# Altium footprint library PcbLib1.PcbLib: 24 footprints (part 2 of 2)
Each footprint in its own frame and in the unit in brackets; x right, y up, seen from the top. Pads: shape width x height; smd on the part's side, far side on the other; paste and mask are expansions set on the pad; w line width, h text height; cw(c..) or ccw(c..) is an arc to the next point about the centre after c.
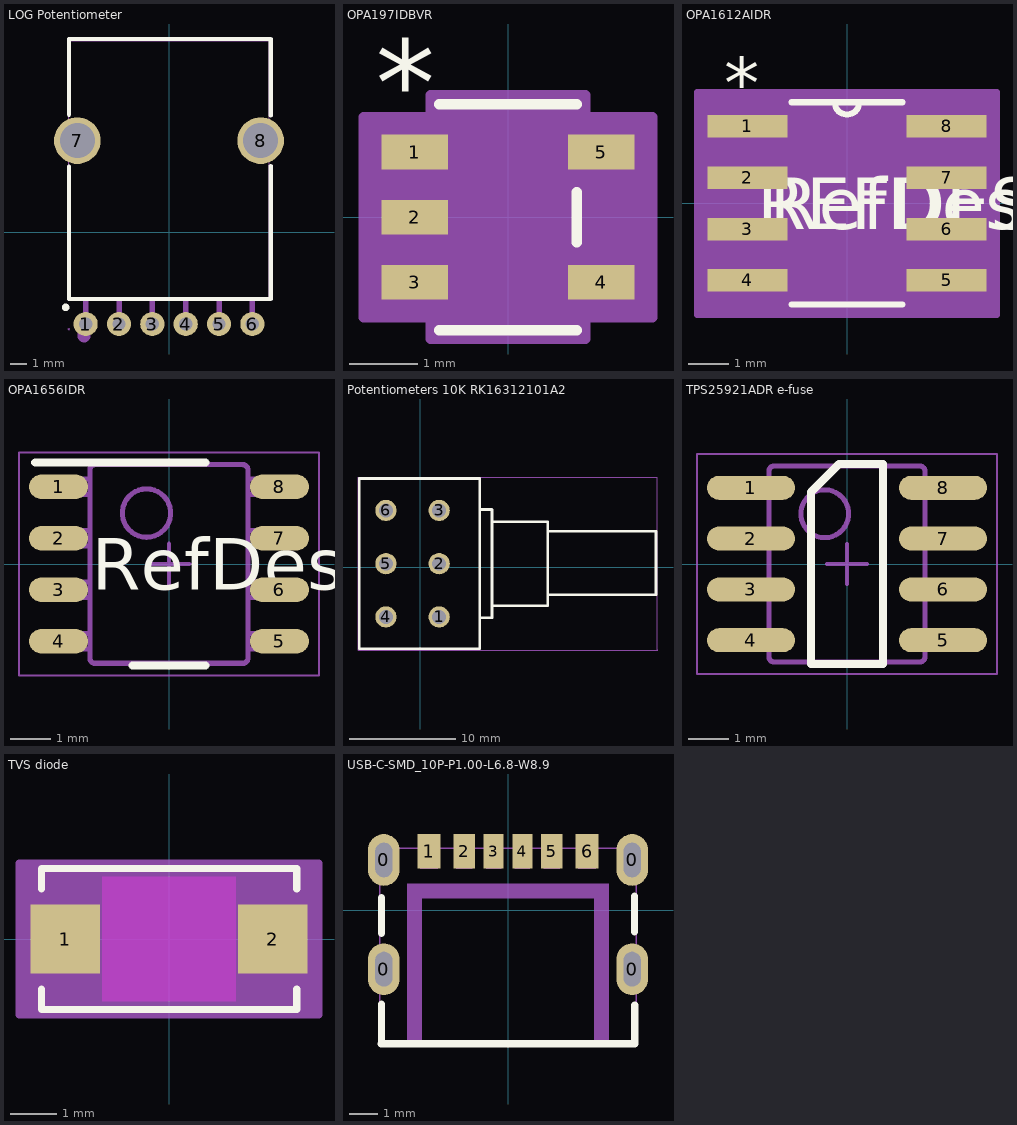
[diagram p1: the footprints below, top view; thin cyan lines are the x and y axes]

## LOG Potentiometer [mm]
pads (8):
  round 1.45 hole 0.8 paste-2539.97 mask+0.05: 1(-5,-5.5) 2(-3,-5.5) 3(-1,-5.5) 4(1,-5.5) 5(3,-5.5) 6(5,-5.5)
  round 2.8 hole 2.1 paste-2539.97 mask+0.05: 7(-5.5,5.5) 8(5.5,5.5)
Top Overlay:
  circle w0.254: c-6.2,-4.5 r0.1
  lines w0.254: -6,3.947 -6,-4.001 6.1,-4.001 6.1,3.983 ; -6,7.052 -6,11.599 6.1,11.599 6.1,7.017
Mechanical 2:
  circle w0.4: c-5.1,-6.2 r0.2
Mechanical 6:
  lines w0.051: -6,-4.001 6,-4.001 6,11.499 -6,11.499 -6,-4.001
Mechanical 7:
  region: 4.851,-5.795 4.851,-3.95 5.151,-3.95 5.151,-5.795
  region: 2.851,-5.795 2.851,-3.95 3.151,-3.95 3.151,-5.795
  region: 0.851,-5.795 0.851,-3.95 1.151,-3.95 1.151,-5.795
  region: -1.149,-5.795 -1.149,-3.95 -0.849,-3.95 -0.849,-5.795
  region: -3.149,-5.795 -3.149,-3.95 -2.849,-3.95 -2.849,-5.795
  region: -5.149,-5.795 -5.149,-3.95 -4.849,-3.95 -4.849,-5.795
Mechanical 8:
  region: -5.94,-5.8 -5.94,-5.825 -5.975,-5.86 -6.025,-5.86 -6.06,-5.825 -6.06,-5.8 -6.06,-5.775 -6.025,-5.74 -5.975,-5.74 -5.94,-5.775
Mechanical 9:
  region: -5.65,4.5 -5.65,6.5 -5.35,6.5 -5.35,4.5
  region: 5.35,4.5 5.35,6.5 5.65,6.5 5.65,4.5
  region: -5.15,-5.8 -5.15,-5.2 -4.85,-5.2 -4.85,-5.8
  region: -3.15,-5.8 -3.15,-5.2 -2.85,-5.2 -2.85,-5.8
  region: -1.15,-5.8 -1.15,-5.2 -0.85,-5.2 -0.85,-5.8
  region: 0.85,-5.8 0.85,-5.2 1.15,-5.2 1.15,-5.8
  region: 2.85,-5.8 2.85,-5.2 3.15,-5.2 3.15,-5.8
  region: 4.85,-5.8 4.85,-5.2 5.15,-5.2 5.15,-5.8

## OPA197IDBVR [mil]
pads (5):
  rect 38.28x20 smd paste+0 mask+0: 1(-53.64,37.4) 2(-53.64,0) 3(-53.64,-37.4) 4(53.64,-37.4) 5(53.64,37.4)
Top Overlay:
  lines w6: -39.5,-65 39.5,-65 ; -39.5,65 39.5,65 ; 39.5,-14.3 39.5,14.3
  text "*" at -76.14,52.4 h50
  text ".Designator" at -137.5,-25 h50
Mechanical 13:
  lines w1: -12,60 ccw(c0,60) 12,60 ; -59,-47.4 -59,-27.4 -34.5,-27.4 -34.5,-47.4 -59,-47.4 ; -59,-10 -59,10 -34.5,10 -34.5,-10 -59,-10 ; -59,27.4 -59,47.4 -34.5,47.4 -34.5,27.4 -59,27.4 ; -34.5,-60 34.5,-60 34.5,60 -34.5,60 -34.5,-60 ; 34.5,-47.4 34.5,-27.4 59,-27.4 59,-47.4 34.5,-47.4 ; 34.5,27.4 34.5,47.4 59,47.4 59,27.4 34.5,27.4
  text ".Designator" at -137.5,-25 h50
  text "*" at -37,14.4 h50
Mechanical 15:
  region: 44.5,-70 -44.5,-70 -44.5,-57.4 -82.78,-57.4 -82.78,57.4 -44.5,57.4 -44.5,70 44.5,70 44.5,57.4 82.78,57.4 82.78,-57.4 44.5,-57.4
  lines w6: -82.78,-57.4 -44.5,-57.4 -44.5,-70 44.5,-70 44.5,-57.4 82.78,-57.4 82.78,57.4 44.5,57.4 44.5,70 -44.5,70 -44.5,57.4 -82.78,57.4 -82.78,-57.4
3D body "DBV5_TEX.step": height 57.09, standoff 0, extent -59.02,-60 59.02,60

## OPA1612AIDR [mil]
pads (8):
  rect 78x22 smd paste-39 mask-39: 1(-97,75) 2(-97,25) 3(-97,-25) 4(-97,-75) 5(97,-75) 6(97,-25) 7(97,25) 8(97,75)
Top Overlay:
  lines w6: -54.08,-98.5 54.08,-98.5 ; -54.08,98.5 54.08,98.5 ; -12,98.5 ccw(c0,98.5) 12,98.5
  text "REFDES" at -87.5,-25 h50
  text "*" at -119.5,92 h50
  text "RefDes" at -75,-25 h50
Mechanical 13:
  lines w0: -12,98.5 ccw(c0,98.5) 12,98.5
  lines w1: -122,-85 -122,-65 -78.5,-65 -78.5,-85 -122,-85 ; -122,-35 -122,-15 -78.5,-15 -78.5,-35 -122,-35 ; -122,15 -122,35 -78.5,35 -78.5,15 -122,15 ; -122,65 -122,85 -78.5,85 -78.5,65 -122,65 ; -78.5,-98.5 78.5,-98.5 78.5,98.5 -78.5,98.5 -78.5,-98.5 ; 78.5,-85 78.5,-65 122,-65 122,-85 78.5,-85 ; 78.5,-35 78.5,-15 122,-15 122,-35 78.5,-35 ; 78.5,15 78.5,35 122,35 122,15 78.5,15 ; 78.5,65 78.5,85 122,85 122,65 78.5,65
  text "*" at -119.5,92 h50
  text "RefDes2" at -87.5,-25 h50
Mechanical 15:
  region: 146,-108.5 -146,-108.5 -146,108.5 146,108.5
  lines w6: -146,-108.5 -146,108.5 146,108.5 146,-108.5 -146,-108.5
3D body "D8.step": height 69.09, standoff 0, extent -122.01,-98.5 122.01,98.5

## OPA1656IDR [mm]
pads (8):
  oval 1.45x0.6 smd paste+0 mask+0: 1(-2.725,1.905) 2(-2.725,0.635) 3(-2.725,-0.635) 4(-2.725,-1.905) 5(2.725,-1.905) 6(2.725,-0.635) 7(2.725,0.635) 8(2.725,1.905)
Top Overlay:
  lines w0.2: -3.3,2.5 0.9,2.5 ; -0.9,-2.5 0.9,-2.5
  text "RefDes" at -1.905,-0.635 h1.27
Mechanical 13:
  lines w0.127: -2.375,-2.095 -2.375,-1.715 ; -2.375,-2.095 -2.589,-2.095 -3.002,-2.095 -3.002,-1.715 -2.589,-1.715 -2.375,-1.715 ; -2.375,-2.095 -1.995,-2.095 -1.952,-2.095 -1.952,-1.715 -1.995,-1.715 -2.375,-1.715 ; -2.375,-0.825 -2.375,-0.445 ; -2.375,-0.825 -2.589,-0.825 -3.002,-0.825 -3.002,-0.445 -2.589,-0.445 -2.375,-0.445 ; -2.375,-0.825 -1.995,-0.825 -1.952,-0.825 -1.952,-0.445 -1.995,-0.445 -2.375,-0.445 ; -2.375,0.445 -2.375,0.825 ; -2.375,0.445 -2.589,0.445 -3.002,0.445 -3.002,0.825 -2.589,0.825 -2.375,0.825 ; -2.375,0.445 -1.995,0.445 -1.952,0.445 -1.952,0.825 -1.995,0.825 -2.375,0.825 ; -2.375,1.715 -2.375,2.095 ; -2.375,1.715 -2.589,1.715 -3.002,1.715 -3.002,2.095 -2.589,2.095 -2.375,2.095 ; -2.375,1.715 -1.995,1.715 -1.952,1.715 -1.952,2.095 -1.995,2.095 -2.375,2.095 ; -0.332,-2.45 -0.182,-2.45 ; -0.332,-2.45 -0.182,-2.45 ; -0.332,-2.45 -1.825,-2.45 -1.826,-2.45 cw(c-1.825,-2.323) -1.952,-2.324 -1.952,-2.323 -1.952,2.323 -1.952,2.324 cw(c-1.825,2.323) -1.826,2.45 -1.825,2.45 -0.332,2.45 ; -0.332,2.45 -0.182,2.45 ; -0.332,2.45 -0.182,2.45 ; -0.182,-2.45 0.178,-2.45 ; -0.182,2.45 0.178,2.45 ; 0.178,-2.45 0.328,-2.45 ; 0.178,-2.45 0.328,-2.45 ; 0.178,2.45 0.328,2.45 ; 0.178,2.45 0.328,2.45 ; 0.328,-2.45 1.821,-2.45 1.822,-2.45 ccw(c1.821,-2.323) 1.948,-2.324 1.948,-2.323 1.948,2.323 1.948,2.324 ccw(c1.821,2.323) 1.822,2.45 1.821,2.45 0.328,2.45 ; 2.371,-2.095 2.371,-1.715 ; 2.371,-2.095 1.991,-2.095 1.948,-2.095 1.948,-1.715 1.991,-1.715 2.371,-1.715 ; 2.371,-2.095 2.585,-2.095 2.998,-2.095 2.998,-1.715 2.585,-1.715 2.371,-1.715 ; 2.371,-0.825 2.371,-0.445 ; 2.371,-0.825 1.991,-0.825 1.948,-0.825 1.948,-0.445 1.991,-0.445 2.371,-0.445 ; 2.371,-0.825 2.585,-0.825 2.998,-0.825 2.998,-0.445 2.585,-0.445 2.371,-0.445 ; 2.371,0.445 2.371,0.825 ; 2.371,0.445 1.991,0.445 1.948,0.445 1.948,0.825 1.991,0.825 2.371,0.825 ; 2.371,0.445 2.585,0.445 2.998,0.445 2.998,0.825 2.585,0.825 2.371,0.825 ; 2.371,1.715 2.371,2.095 ; 2.371,1.715 1.991,1.715 1.948,1.715 1.948,2.095 1.991,2.095 2.371,2.095 ; 2.371,1.715 2.585,1.715 2.998,1.715 2.998,2.095 2.585,2.095 2.371,2.095 ; -0.555,0.659 ccw(c-0.555,1.256) -0.555,1.853 ccw(c-0.555,1.256) -0.555,0.659
Mechanical 15:
  lines w0.05: -3.7,-2.75 -3.7,2.75 3.7,2.75 3.7,-2.75 -3.7,-2.75
  lines w0.1: -0.5,0 0.5,0 ; 0,-0.5 0,0.5

## Potentiometers 10K RK16312101A2 [mm] "10K"
pads (6):
  round 2 hole 1.3: 1(1.778,-4.686) 2(1.778,0.314) 3(1.778,5.314) 4(-3.222,-4.686) 5(-3.222,0.314) 6(-3.222,5.314)
Top Overlay:
  lines w0.254: -5.715,-7.687 5.588,-7.687 ; -5.715,-7.686 -5.715,8.315 5.588,8.315 5.588,-7.685 ; 5.588,-4.766 6.731,-4.766 ; 5.588,5.394 6.731,5.394 6.731,-4.732 ; 6.731,-3.623 11.978,-3.623 11.978,4.248 6.731,4.248 ; 11.978,-2.607 22.138,-2.607 22.138,3.362 12.105,3.362
Mechanical 6:
  lines w0.051: -5.842,-7.814 -5.842,8.442 22.265,8.442 22.265,-7.814 -5.842,-7.814
Mechanical 8:
  region: 22.325,-7.814 22.325,-7.839 22.29,-7.874 22.24,-7.874 22.205,-7.839 22.205,-7.814 22.205,-7.789 22.24,-7.754 22.29,-7.754 22.325,-7.789
Mechanical 9:
  region: 2.328,5.314 2.328,5.205 2.244,5.002 2.09,4.848 1.887,4.764 1.669,4.764 1.466,4.848 1.312,5.002 1.228,5.205 1.228,5.314 1.228,5.423 1.312,5.626 1.466,5.78 1.669,5.864 1.887,5.864 2.09,5.78 2.244,5.626 2.328,5.423
  region: 2.328,0.314 2.328,0.205 2.244,0.002 2.09,-0.152 1.887,-0.236 1.669,-0.236 1.466,-0.152 1.312,0.002 1.228,0.205 1.228,0.314 1.228,0.423 1.312,0.626 1.466,0.78 1.669,0.864 1.887,0.864 2.09,0.78 2.244,0.626 2.328,0.423
  region: 2.328,-4.686 2.328,-4.795 2.244,-4.998 2.09,-5.152 1.887,-5.236 1.669,-5.236 1.466,-5.152 1.312,-4.998 1.228,-4.795 1.228,-4.686 1.228,-4.577 1.312,-4.374 1.466,-4.22 1.669,-4.136 1.887,-4.136 2.09,-4.22 2.244,-4.374 2.328,-4.577
  region: -2.672,-4.686 -2.672,-4.795 -2.756,-4.998 -2.91,-5.152 -3.113,-5.236 -3.331,-5.236 -3.534,-5.152 -3.688,-4.998 -3.772,-4.795 -3.772,-4.686 -3.772,-4.577 -3.688,-4.374 -3.534,-4.22 -3.331,-4.136 -3.113,-4.136 -2.91,-4.22 -2.756,-4.374 -2.672,-4.577
  region: -2.672,0.314 -2.672,0.205 -2.756,0.002 -2.91,-0.152 -3.113,-0.236 -3.331,-0.236 -3.534,-0.152 -3.688,0.002 -3.772,0.205 -3.772,0.314 -3.772,0.423 -3.688,0.626 -3.534,0.78 -3.331,0.864 -3.113,0.864 -2.91,0.78 -2.756,0.626 -2.672,0.423
  region: -2.672,5.314 -2.672,5.205 -2.756,5.002 -2.91,4.848 -3.113,4.764 -3.331,4.764 -3.534,4.848 -3.688,5.002 -3.772,5.205 -3.772,5.314 -3.772,5.423 -3.688,5.626 -3.534,5.78 -3.331,5.864 -3.113,5.864 -2.91,5.78 -2.756,5.626 -2.672,5.423

## TPS25921ADR e-fuse [mm]
pads (8):
  oval 2.2x0.6 smd paste-0.102 mask+0.051: 1(-2.4,1.905) 2(-2.4,0.635) 3(-2.4,-0.635) 4(-2.4,-1.905) 5(2.4,-1.905) 6(2.4,-0.635) 7(2.4,0.635) 8(2.4,1.905)
Top Overlay:
  lines w0.2: -0.9,-2.5 -0.9,1.8 -0.2,2.5 0.9,2.5 0.9,-2.5 -0.9,-2.5
  text ".Designator" at -3.492,-0.635 h1.27
Mechanical 13:
  lines w0.127: -2.375,-2.095 -1.995,-2.095 -1.952,-2.095 -1.952,-1.715 -1.995,-1.715 -2.375,-1.715 ; -2.375,-2.095 -2.589,-2.095 -3.002,-2.095 -3.002,-1.715 -2.589,-1.715 -2.375,-1.715 ; -2.375,-2.095 -2.375,-1.715 ; -2.375,-0.825 -1.995,-0.825 -1.952,-0.825 -1.952,-0.445 -1.995,-0.445 -2.375,-0.445 ; -2.375,-0.825 -2.589,-0.825 -3.002,-0.825 -3.002,-0.445 -2.589,-0.445 -2.375,-0.445 ; -2.375,-0.825 -2.375,-0.445 ; -2.375,0.445 -1.995,0.445 -1.952,0.445 -1.952,0.825 -1.995,0.825 -2.375,0.825 ; -2.375,0.445 -2.589,0.445 -3.002,0.445 -3.002,0.825 -2.589,0.825 -2.375,0.825 ; -2.375,0.445 -2.375,0.825 ; -2.375,1.715 -1.995,1.715 -1.952,1.715 -1.952,2.095 -1.995,2.095 -2.375,2.095 ; -2.375,1.715 -2.589,1.715 -3.002,1.715 -3.002,2.095 -2.589,2.095 -2.375,2.095 ; -2.375,1.715 -2.375,2.095 ; -0.332,-2.45 -1.825,-2.45 -1.826,-2.45 cw(c-1.825,-2.323) -1.952,-2.324 -1.952,-2.323 -1.952,2.323 -1.952,2.324 cw(c-1.825,2.323) -1.826,2.45 -1.825,2.45 -0.332,2.45 ; -0.332,-2.45 -0.182,-2.45 ; -0.332,-2.45 -0.182,-2.45 ; -0.332,2.45 -0.182,2.45 ; -0.332,2.45 -0.182,2.45 ; -0.182,-2.45 0.178,-2.45 ; -0.182,2.45 0.178,2.45 ; 0.178,-2.45 0.328,-2.45 ; 0.178,-2.45 0.328,-2.45 ; 0.178,2.45 0.328,2.45 ; 0.178,2.45 0.328,2.45 ; 0.328,-2.45 1.821,-2.45 1.822,-2.45 ccw(c1.821,-2.323) 1.948,-2.324 1.948,-2.323 1.948,2.323 1.948,2.324 ccw(c1.821,2.323) 1.822,2.45 1.821,2.45 0.328,2.45 ; 2.371,-2.095 2.585,-2.095 2.998,-2.095 2.998,-1.715 2.585,-1.715 2.371,-1.715 ; 2.371,-2.095 1.991,-2.095 1.948,-2.095 1.948,-1.715 1.991,-1.715 2.371,-1.715 ; 2.371,-2.095 2.371,-1.715 ; 2.371,-0.825 2.585,-0.825 2.998,-0.825 2.998,-0.445 2.585,-0.445 2.371,-0.445 ; 2.371,-0.825 1.991,-0.825 1.948,-0.825 1.948,-0.445 1.991,-0.445 2.371,-0.445 ; 2.371,-0.825 2.371,-0.445 ; 2.371,0.445 2.585,0.445 2.998,0.445 2.998,0.825 2.585,0.825 2.371,0.825 ; 2.371,0.445 1.991,0.445 1.948,0.445 1.948,0.825 1.991,0.825 2.371,0.825 ; 2.371,0.445 2.371,0.825 ; 2.371,1.715 2.585,1.715 2.998,1.715 2.998,2.095 2.585,2.095 2.371,2.095 ; 2.371,1.715 1.991,1.715 1.948,1.715 1.948,2.095 1.991,2.095 2.371,2.095 ; 2.371,1.715 2.371,2.095 ; -0.555,0.659 cw(c-0.555,1.256) -0.555,1.853 cw(c-0.555,1.256) -0.555,0.659
  text ".Designator" at -3.492,-0.635 h1.27
Mechanical 15:
  lines w0.05: -3.75,-2.75 -3.75,2.75 3.75,2.75 3.75,-2.75 -3.75,-2.75
  lines w0.1: -0.5,0 0.5,0 ; 0,-0.5 0,0.5

## TVS diode [mil]
pads (2):
  rect 59x59 smd paste+0 mask+0: 1(-88.5,0) 2(88.5,0)
Top Layer keep-out:
  region: -57,-53 -57,53 57,53 57,-53
Top Overlay:
  lines w6: -109,-42.6 -109,-60 109,-60 109,-42.6 ; -109,42.6 -109,60 109,60 109,42.6
  text ".Designator" at -137.5,-25 h50
Keep-Out Layer:
  region: -57,-53 -57,53 57,53 57,-53
Mechanical 13:
  lines w1: -104,-27.5 -76.5,-55 ; -104,27.5 -76.5,55 ; -104,-55 104,-55 104,55 -104,55 -104,-55 ; -104,-28.5 -104,28.5 -104,-28.5 ; 104,-28.5 104,28.5 104,-28.5
  text ".Designator" at -137.5,-25 h50
Mechanical 15:
  region: 128,-65 -128,-65 -128,65 128,65
  lines w6: -128,-65 -128,65 128,65 128,-65 -128,-65

## USB-C-SMD_10P-P1.00-L6.8-W8.9 [mm]
pads (10):
  oval 1.1x1.8 hole 0.6 slot 1.2 at 90 deg: 0(-4.32,-2.05) 0(-4.32,1.75) 0(4.32,-2.05) 0(4.32,1.75)
  rect 0.8x1.2 smd paste-100 mask+0.051: 1(-2.75,2.05) 6(2.75,2.05)
  rect 0.76x1.2 smd paste-100 mask+0.051: 2(-1.52,2.05) 5(1.52,2.05)
  rect 0.7x1.2 smd paste-100 mask+0.051: 3(-0.5,2.05) 4(0.5,2.05)
Top Overlay:
  lines w0.254: -4.41,-4.65 4.41,-4.65 4.409,-3.3 ; -4.4,-4.65 -4.4,-3.27 ; -4.4,-0.8 -4.4,0.44 ; 4.4,-0.752 4.4,0.488
Top Paste:
  drawing of 10 lines, arcs and shapes, not listed
Mechanical 2:
  region: -3.5,-4.575 -3.5,0.925 3.5,0.925 3.5,-4.575 3,-4.575 3,0.425 -3,0.425 -3,-4.575
Mechanical 6:
  lines w0.051: -4.47,-4.65 -4.47,2.15 4.47,2.15 4.47,-4.65 -4.47,-4.65
Mechanical 8:
  region: -4.41,2.25 -4.41,2.225 -4.445,2.19 -4.495,2.19 -4.53,2.225 -4.53,2.25 -4.53,2.275 -4.495,2.31 -4.445,2.31 -4.41,2.275
Mechanical 9:
  region: -4.47,-1.65 -4.17,-1.65 -4.17,-2.45 -4.47,-2.45
  region: 4.17,-1.65 4.47,-1.65 4.47,-2.45 4.17,-2.45
  region: -4.47,2.15 -4.17,2.15 -4.17,1.35 -4.47,1.35
  region: 4.17,2.15 4.47,2.15 4.47,1.35 4.17,1.35
  region: 2.45,2.25 3.05,2.25 3.05,1.45 2.45,1.45
  region: -3.05,2.25 -2.45,2.25 -2.45,1.45 -3.05,1.45
  region: -0.76,2.25 -0.24,2.25 -0.24,1.45 -0.76,1.45
  region: 0.24,2.25 0.76,2.25 0.76,1.45 0.24,1.45
  region: 1.24,2.25 1.8,2.25 1.8,1.45 1.24,1.45
  region: -1.8,2.25 -1.24,2.25 -1.24,1.45 -1.8,1.45